# Altium footprint library Pcb_Jumper.PcbLib: 5 footprints
Each footprint in its own frame and in the unit in brackets; x right, y up, seen from the top. Pads: shape width x height; smd on the part's side, far side on the other; paste and mask are expansions set on the pad; w line width, h text height; cw(c..) or ccw(c..) is an arc to the next point about the centre after c.
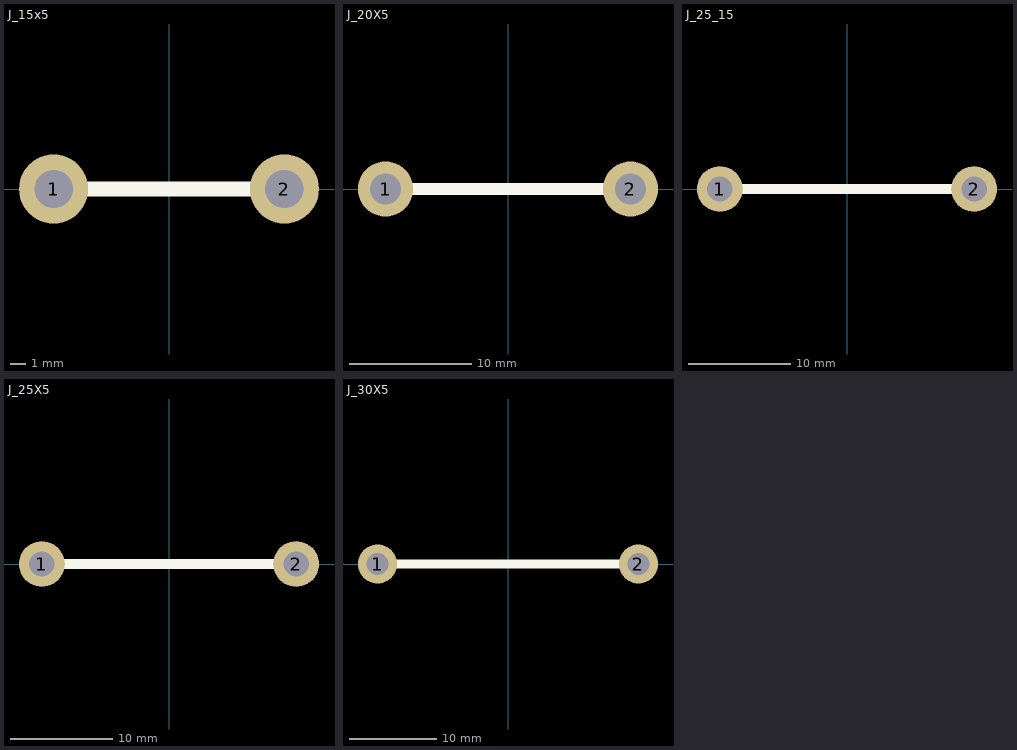
[diagram p0: the footprints below, top view; thin cyan lines are the x and y axes]

## J_15x5 [mm] "J_15x5"
pads (2):
  round 4.5 hole 2.5: 1(-7.5,0) 2(7.5,0)
Top Overlay:
  lines w1: -7.5,0 7.5,0
3D body "Перемычка 15 х 5.x_t": height 6, standoff -4, extent -9.25,-0.993 9.25,0.993

## J_20X5 [mm] "J_20X5"
pads (2):
  round 4.5 hole 2.5: 1(-10,0) 2(10,0)
Top Overlay:
  lines w1: -10,0 10,0
3D body "Перемычка 20 х 5.x_t": height 5.99, standoff -4, extent -11.75,-1 11.75,1

## J_25_15 [mm] "J_25_15"
pads (2):
  round 4.5 hole 2.5: 1(-12.5,0) 2(12.5,0)
Top Overlay:
  lines w1: -12.5,0 12.5,0
3D body "Перемычка к трансформатору тока.x_t": height 15.5, standoff -4, extent -14.25,-0.993 14.25,0.993

## J_25X5 [mm] "J_25X5"
pads (2):
  round 4.5 hole 2.5: 1(-12.5,0) 2(12.5,0)
Top Overlay:
  lines w1: -12.5,0 12.5,0
3D body "Перемычка 25 х 5.x_t": height 6, standoff -4, extent -14.25,-0.993 14.25,0.993

## J_30X5 [mm] "J_30X5"
pads (2):
  round 4.5 hole 2.5: 1(-15,0) 2(15,0)
Top Overlay:
  lines w1: -15,0 15,0
3D body "Перемычка 30 х 5.x_t": height 5.99, standoff -4, extent -16.75,-1 16.75,1